# Altium integrated library NHD-1.8-128160EF-CSXN_.IntLib: 1 symbol
Pins are listed as number, name and electrical type; pins without a type are passive.

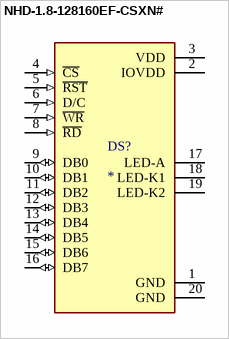
[diagram p0: symbol NHD-1.8-128160EF-CSXN#]

## NHD-1.8-128160EF-CSXN#
designator DS?
Graphic LCD Display Module Transmissive Red, Green, Blue (RGB) TFT - Color Parallel, 8-Bit 1.8 (45.72mm) 128 x 160; MF: Newhaven Display; MP: NHD-1.8-128160EF-CSXN#; Package: None; Value: *; Purchase-URL: https://pricing.snapeda.com/search/part/NHD-1.8-128160EF-CSXN#/?ref=eda; Availability: Warning; Check_prices: https://www.snapeda.com/parts/NHD-1.8-128160EF-CSXN%23/Newhaven%20Display%20Intl/view-part/426299/?ref=eda; SnapEDA_Link: https://www.snapeda.com/parts/NHD-1.8-128160EF-CSXN%23/Newhaven%20Display%20Intl/view-part/426299/?ref=snap; Price: None
footprint MODULE_NHD-1.8-128160EF-CSXN#
pins: 1 GND (power), 2 IOVDD (power), 3 VDD (power), 4 ~{CS} (in), 5 ~{RST} (in), 6 D/C (in), 7 ~{WR} (in), 8 ~{RD} (in), 9 DB0 (io), 10 DB1 (io), 11 DB2 (io), 12 DB3 (io), 13 DB4 (io), 14 DB5 (io), 15 DB6 (io), 16 DB7 (io), 17 LED-A, 18 LED-K1, 19 LED-K2, 20 GND (power)